# Altium schematic symbol library CC0402KRX7R9BB751.SchLib: 1 symbol
Pins are listed as number, name and electrical type; pins without a type are passive.

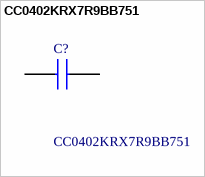
[diagram p0: symbol CC0402KRX7R9BB751]

## CC0402KRX7R9BB751
designator C?
Multilayer Ceramic Capacitors MLCC - SMD/SMT 750pF 50V 10% 0402 Case Size; Manufacturer_Name: Yageo Group; Geometry.Height: 0.55mm; Mouser Part Number: 603-CC0402KR9BB751; Mouser Price/Stock: https://www.mouser.com/Search/Refine.aspx?Keyword=603-CC0402KR9BB751; Manufacturer_Part_Number: CC0402KRX7R9BB751; Datasheet Link: https://componentsearchengine.com/Datasheets/1/CC0402KRX7R9BB751.pdf
footprint CAPC1005X55N
pins: 1, 2